# Altium footprint library WR-RAST.PcbLib: 73 footprints (part 3 of 5)
Each footprint in its own frame and in the unit in brackets; x right, y up, seen from the top. Pads: shape width x height; smd on the part's side, far side on the other; paste and mask are expansions set on the pad; w line width, h text height; cw(c..) or ccw(c..) is an arc to the next point about the centre after c.
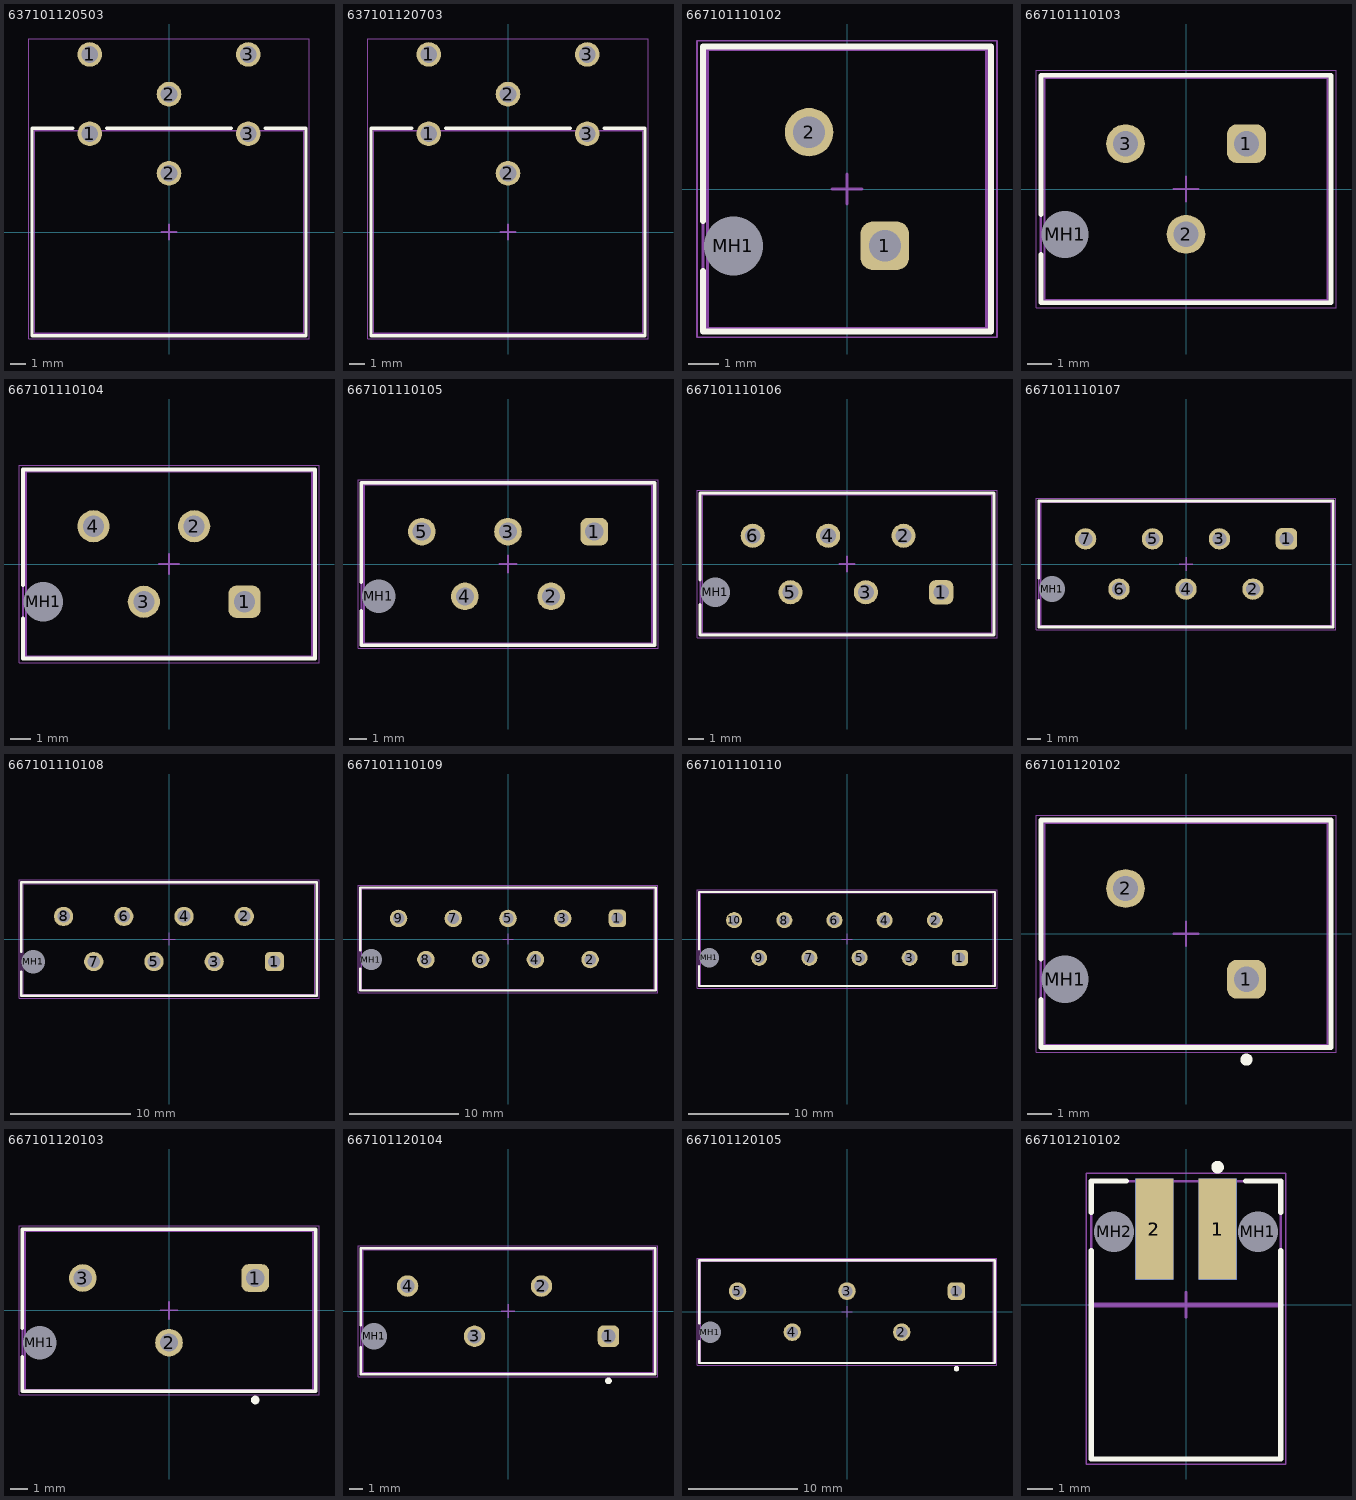
[diagram p2: the footprints below, top view; thin cyan lines are the x and y axes]

## 637101120503 [mm] "THT Horizontal Male Header, pitch 5mm, 3p"
height 14.9
pads (6):
  round 1.55 hole 1.05: 1(-5,6.201) 1(-5,11.201) 2(0,3.701) 2(0,8.701) 3(5,6.201) 3(5,11.201)
Top Overlay:
  lines w0.2: -6.05,6.55 -8.65,6.55 -8.65,-6.55 8.65,-6.55 8.65,6.55 6.05,6.55 ; -3.95,6.55 3.95,6.55
Top Assembly:
  lines w0.1: -8.5,-6.4 -8.5,6.4 8.5,6.4 8.5,-6.4 -8.5,-6.4
Top Designator:
  text ".Designator" at -3.647,-0.357 h1
Top Courtyard:
  lines w0.05: -8.85,-6.75 -8.85,12.176 8.85,12.176 8.85,-6.75 -8.85,-6.75
Top Component Center:
  lines w0.1: -0.5,0 0.5,0 ; 0,-0.5 0,0.5
3D body "637101120503.stp": height 15.45, standoff -3.45, extent -8.501,-6.401 8.501,11.601

## 637101120703 [mm] "THT Horizontal Male Header, pitch 5mm, 3p"
height 14.9
pads (6):
  round 1.55 hole 1.05: 1(-5,6.201) 1(-5,11.201) 2(0,3.701) 2(0,8.701) 3(5,6.201) 3(5,11.201)
Top Overlay:
  lines w0.2: -6.05,6.55 -8.65,6.55 -8.65,-6.55 8.65,-6.55 8.65,6.55 6.05,6.55 ; -3.95,6.55 3.95,6.55
Top Assembly:
  lines w0.1: -8.5,-6.4 -8.5,6.4 8.5,6.4 8.5,-6.4 -8.5,-6.4
Top Designator:
  text ".Designator" at -3.647,-0.357 h1
Top Courtyard:
  lines w0.05: -8.85,-6.75 -8.85,12.176 8.85,12.176 8.85,-6.75 -8.85,-6.75
Top Component Center:
  lines w0.1: -0.5,0 0.5,0 ; 0,-0.5 0,0.5
3D body "637101120703.stp": height 15.45, standoff -3.45, extent -8.501,-6.401 8.501,11.601

## 667101110102 [mm] "RAST 2.5 Header Vertical THT 2.5mm Pitch for Direct or Indirect Mating with locking features, 02p"
height 15.6
pads (3):
  rrect50% 1.6x1.6 hole 1.05: 1(1.25,-1.875)
  round 1.6 hole 1.05: 2(-1.25,1.875)
  round 1.85 hole 1.95 unplated: MH1(-3.75,-1.875)
Top Overlay:
  lines w0.2: -4.75,-2.7 -4.75,-4.7 4.75,-4.7 4.75,4.7 -4.75,4.7 -4.75,-1.05
Top Assembly:
  lines w0.1: -4.75,-4.7 4.75,-4.7 4.75,4.7 -4.75,4.7 -4.75,-4.7
Top Designator:
  text ".Designator" at -3.647,-0.357 h1
Top 3D Body:
  lines w0.1: -4.6,-4.6 4.6,-4.6 4.6,4.6 -4.6,4.6 -4.6,-4.6
Top Courtyard:
  lines w0.05: -4.95,-4.9 4.95,-4.9 4.95,4.9 -4.95,4.9 -4.95,-4.9
Top Component Center:
  lines w0.1: -0.5,0 0.5,0 ; 0,-0.5 0,0.5
3D body "667101110102.stp": height 15.65, standoff -4.25, extent -4.6,-4.6 4.6,4.6

## 667101110103 [mm] "RAST 2.5 Header Vertical THT 2.5mm Pitch for Direct or Indirect Mating with locking features, 03p"
height 15.6
pads (4):
  rrect50% 1.6x1.6 hole 1.05: 1(2.5,1.875)
  round 1.6 hole 1.05: 2(0,-1.875) 3(-2.5,1.875)
  round 1.85 hole 1.95 unplated: MH1(-5,-1.875)
Top Overlay:
  lines w0.2: -6,-2.7 -6,-4.7 6,-4.7 6,4.7 -6,4.7 -6,-1.05
Top Assembly:
  lines w0.1: -6,-4.7 6,-4.7 6,4.7 -6,4.7 -6,-4.7
Top Designator:
  text ".Designator" at -3.647,-0.357 h1
Top 3D Body:
  lines w0.1: -5.85,-4.6 5.85,-4.6 5.85,4.6 -5.85,4.6 -5.85,-4.6
Top Courtyard:
  lines w0.05: -6.2,-4.9 6.2,-4.9 6.2,4.9 -6.2,4.9 -6.2,-4.9
Top Component Center:
  lines w0.1: -0.5,0 0.5,0 ; 0,-0.5 0,0.5
3D body "667101110103.stp": height 15.65, standoff -4.25, extent -5.85,-4.6 5.85,4.6

## 667101110104 [mm] "RAST 2.5 Header Vertical THT 2.5mm Pitch for Direct or Indirect Mating with locking features, 04p"
height 15.6
pads (5):
  rrect50% 1.6x1.6 hole 1.05: 1(3.75,-1.875)
  round 1.6 hole 1.05: 2(1.25,1.875) 3(-1.25,-1.875) 4(-3.75,1.875)
  round 1.85 hole 1.95 unplated: MH1(-6.25,-1.875)
Top Overlay:
  lines w0.2: -7.25,-2.7 -7.25,-4.7 7.25,-4.7 7.25,4.7 -7.25,4.7 -7.25,-1.05
Top Assembly:
  lines w0.1: -7.25,-4.7 -7.25,4.7 7.25,4.7 7.25,-4.7 -7.25,-4.7
Top Designator:
  text ".Designator" at -3.647,-0.357 h1
Top 3D Body:
  lines w0.1: -7.1,-4.6 -7.1,4.6 7.1,4.6 7.1,-4.6 -7.1,-4.6
Top Courtyard:
  lines w0.05: -7.45,-4.9 -7.45,4.9 7.45,4.9 7.45,-4.9 -7.45,-4.9
Top Component Center:
  lines w0.1: -0.5,0 0.5,0 ; 0,-0.5 0,0.5
3D body "667101110104.stp": height 15.65, standoff -4.25, extent -7.1,-4.6 7.1,4.6

## 667101110105 [mm] "RAST 2.5 Header Vertical THT 2.5mm Pitch for Direct or Indirect Mating with locking features, 05p"
height 15.6
pads (6):
  rrect50% 1.6x1.6 hole 1.05: 1(5,1.875)
  round 1.6 hole 1.05: 2(2.5,-1.875) 3(0,1.875) 4(-2.5,-1.875) 5(-5,1.875)
  round 1.85 hole 1.95 unplated: MH1(-7.5,-1.875)
Top Overlay:
  lines w0.2: -8.5,-2.7 -8.5,-4.7 8.5,-4.7 8.5,4.7 -8.5,4.7 -8.5,-1.05
Top Assembly:
  lines w0.1: -8.5,-4.7 8.5,-4.7 8.5,4.7 -8.5,4.7 -8.5,-4.7
Top Designator:
  text ".Designator" at -3.647,-0.357 h1
Top 3D Body:
  lines w0.1: -8.35,-4.6 8.35,-4.6 8.35,4.6 -8.35,4.6 -8.35,-4.6
Top Courtyard:
  lines w0.05: -8.7,-4.9 8.7,-4.9 8.7,4.9 -8.7,4.9 -8.7,-4.9
Top Component Center:
  lines w0.1: -0.5,0 0.5,0 ; 0,-0.5 0,0.5
3D body "667101110105.stp": height 15.65, standoff -4.25, extent -8.35,-4.6 8.45,4.6

## 667101110106 [mm] "RAST 2.5 Header Vertical THT 2.5mm Pitch for Direct or Indirect Mating with locking features, 06p"
height 15.6
pads (7):
  rrect50% 1.6x1.6 hole 1.05: 1(6.25,-1.875)
  round 1.6 hole 1.05: 2(3.75,1.875) 3(1.25,-1.875) 4(-1.25,1.875) 5(-3.75,-1.875) 6(-6.25,1.875)
  round 1.85 hole 1.95 unplated: MH1(-8.75,-1.875)
Top Overlay:
  lines w0.2: -9.75,-2.7 -9.75,-4.7 9.75,-4.7 9.75,4.7 -9.75,4.7 -9.75,-1.05
Top Assembly:
  lines w0.1: -9.75,-4.7 9.75,-4.7 9.75,4.7 -9.75,4.7 -9.75,-4.7
Top Designator:
  text ".Designator" at -3.647,-0.357 h1
Top 3D Body:
  lines w0.1: -9.6,-4.6 9.6,-4.6 9.6,4.6 -9.6,4.6 -9.6,-4.6
Top Courtyard:
  lines w0.05: -9.95,-4.9 9.95,-4.9 9.95,4.9 -9.95,4.9 -9.95,-4.9
Top Component Center:
  lines w0.1: -0.5,0 0.5,0 ; 0,-0.5 0,0.5
3D body "667101110106.stp": height 15.65, standoff -4.25, extent -9.6,-4.6 9.7,4.6

## 667101110107 [mm] "RAST 2.5 Header Vertical THT 2.5mm Pitch for Direct or Indirect Mating with locking features, 07p"
height 15.6
pads (8):
  rrect50% 1.6x1.6 hole 1.05: 1(7.5,1.875)
  round 1.6 hole 1.05: 2(5,-1.875) 3(2.5,1.875) 4(0,-1.875) 5(-2.5,1.875) 6(-5,-1.875) 7(-7.5,1.875)
  round 1.85 hole 1.95 unplated: MH1(-10,-1.875)
Top Overlay:
  lines w0.2: -11,-2.7 -11,-4.7 11,-4.7 11,4.7 -11,4.7 -11,-1.05
Top Assembly:
  lines w0.1: -11,-4.7 -11,4.7 11,4.7 11,-4.7 -11,-4.7
Top Designator:
  text ".Designator" at -3.647,-0.357 h1
Top 3D Body:
  lines w0.1: -10.85,-4.6 -10.85,4.6 10.85,4.6 10.85,-4.6 -10.85,-4.6
Top Courtyard:
  lines w0.05: -11.2,-4.9 -11.2,4.9 11.2,4.9 11.2,-4.9 -11.2,-4.9
Top Component Center:
  lines w0.1: -0.5,0 0.5,0 ; 0,-0.5 0,0.5
3D body "667101110107.stp": height 15.65, standoff -4.25, extent -10.85,-4.6 10.95,4.6

## 667101110108 [mm] "RAST 2.5 Header Vertical THT 2.5mm Pitch for Direct or Indirect Mating with locking features, 08p"
height 15.6
pads (9):
  rrect50% 1.6x1.6 hole 1.05: 1(8.75,-1.875)
  round 1.6 hole 1.05: 2(6.25,1.875) 3(3.75,-1.875) 4(1.25,1.875) 5(-1.25,-1.875) 6(-3.75,1.875) 7(-6.25,-1.875) 8(-8.75,1.875)
  round 1.85 hole 1.95 unplated: MH1(-11.25,-1.875)
Top Overlay:
  lines w0.2: -12.25,-2.7 -12.25,-4.7 12.25,-4.7 12.25,4.7 -12.25,4.7 -12.25,-1.05
Top Assembly:
  lines w0.1: -12.25,-4.7 12.25,-4.7 12.25,4.7 -12.25,4.7 -12.25,-4.7
Top Designator:
  text ".Designator" at -3.647,-0.357 h1
Top 3D Body:
  lines w0.1: -12.1,-4.6 12.1,-4.6 12.1,4.6 -12.1,4.6 -12.1,-4.6
Top Courtyard:
  lines w0.05: -12.45,-4.9 12.45,-4.9 12.45,4.9 -12.45,4.9 -12.45,-4.9
Top Component Center:
  lines w0.1: -0.5,0 0.5,0 ; 0,-0.5 0,0.5
3D body "667101110108.stp": height 15.65, standoff -4.25, extent -12.1,-4.6 12.2,4.6

## 667101110109 [mm] "RAST 2.5 Header Vertical THT 2.5mm Pitch for Direct or Indirect Mating with locking features, 09p"
height 15.6
pads (10):
  rrect50% 1.6x1.6 hole 1.05: 1(10,1.875)
  round 1.6 hole 1.05: 2(7.5,-1.875) 3(5,1.875) 4(2.5,-1.875) 5(0,1.875) 6(-2.5,-1.875) 7(-5,1.875) 8(-7.5,-1.875) 9(-10,1.875)
  round 1.85 hole 1.95 unplated: MH1(-12.5,-1.875)
Top Overlay:
  lines w0.2: -13.5,-2.7 -13.5,-4.7 13.5,-4.7 13.5,4.7 -13.5,4.7 -13.5,-1.05
Top Assembly:
  lines w0.1: -13.5,-4.7 -13.5,4.7 13.5,4.7 13.5,-4.7 -13.5,-4.7
Top Designator:
  text ".Designator" at -3.647,-0.357 h1
Top 3D Body:
  lines w0.1: -13.35,-4.6 -13.35,4.6 13.35,4.6 13.35,-4.6 -13.35,-4.6
Top Courtyard:
  lines w0.05: -13.7,-4.9 -13.7,4.9 13.7,4.9 13.7,-4.9 -13.7,-4.9
Top Component Center:
  lines w0.1: -0.5,0 0.5,0 ; 0,-0.5 0,0.5
3D body "667101110109.stp": height 15.65, standoff -4.25, extent -13.35,-4.6 13.45,4.6

## 667101110110 [mm] "RAST 2.5 Header Vertical THT 2.5mm Pitch for Direct or Indirect Mating with locking features, 10p"
height 15.6
pads (11):
  rrect50% 1.6x1.6 hole 1.05: 1(11.25,-1.875)
  round 1.6 hole 1.05: 2(8.75,1.875) 3(6.25,-1.875) 4(3.75,1.875) 5(1.25,-1.875) 6(-1.25,1.875) 7(-3.75,-1.875) 8(-6.25,1.875) 9(-8.75,-1.875) 10(-11.25,1.875)
  round 1.85 hole 1.95 unplated: MH1(-13.75,-1.875)
Top Overlay:
  lines w0.2: -14.75,-2.7 -14.75,-4.7 14.75,-4.7 14.75,4.7 -14.75,4.7 -14.75,-1.05
Top Assembly:
  lines w0.1: -14.75,-4.7 -14.75,4.7 14.75,4.7 14.75,-4.7 -14.75,-4.7
Top Designator:
  text ".Designator" at -3.647,-0.357 h1
Top 3D Body:
  lines w0.1: -14.6,-4.6 -14.6,4.6 14.6,4.6 14.6,-4.6 -14.6,-4.6
Top Courtyard:
  lines w0.05: -14.95,-4.9 -14.95,4.9 14.95,4.9 14.95,-4.9 -14.95,-4.9
Top Component Center:
  lines w0.1: -0.5,0 0.5,0 ; 0,-0.5 0,0.5
3D body "667101110110.stp": height 15.65, standoff -4.25, extent -14.6,-4.6 14.7,4.6

## 667101120102 [mm] "RAST 2.5 Header vertical THT 5mm Pitch for Direct or Indirect Mating with locking features, 02p"
height 15.6
pads (3):
  rrect50% 1.6x1.6 hole 1.05: 1(2.5,-1.875)
  round 1.6 hole 1.05: 2(-2.5,1.875)
  round 1.85 hole 1.95 unplated: MH1(-5,-1.875)
Top Overlay:
  circle w0.25: c2.5,-5.2 r0.125
  lines w0.2: -6,-2.7 -6,-4.7 6,-4.7 6,4.7 -6,4.7 -6,-1.05
Top Assembly:
  lines w0.1: -6,-4.7 6,-4.7 6,4.7 -6,4.7 -6,-4.7
Top Designator:
  text ".Designator" at -3.647,-0.357 h1
Top 3D Body:
  lines w0.1: -5.85,-4.6 -5.85,4.6 5.85,4.6 5.85,-4.6 -5.85,-4.6
Top Courtyard:
  lines w0.05: -6.2,-4.9 -6.2,4.9 6.2,4.9 6.2,-4.9 -6.2,-4.9
Top Component Center:
  lines w0.1: -0.5,0 0.5,0 ; 0,-0.5 0,0.5
3D body "667101120102.stp": height 15.65, standoff -4.25, extent -5.85,-4.6 5.85,4.6

## 667101120103 [mm] "RAST 2.5 Header vertical THT 5mm Pitch for Direct or Indirect Mating with locking features, 03p"
height 15.6
pads (4):
  rrect50% 1.6x1.6 hole 1.05: 1(5,1.875)
  round 1.6 hole 1.05: 2(0,-1.875) 3(-5,1.875)
  round 1.85 hole 1.95 unplated: MH1(-7.5,-1.875)
Top Overlay:
  circle w0.25: c5,-5.2 r0.125
  lines w0.2: -8.5,-2.7 -8.5,-4.7 8.5,-4.7 8.5,4.7 -8.5,4.7 -8.5,-1.05
Top Assembly:
  lines w0.1: -8.5,-4.7 -8.5,4.7 8.5,4.7 8.5,-4.7 -8.5,-4.7
Top Designator:
  text ".Designator" at -3.647,-0.357 h1
Top 3D Body:
  lines w0.1: -8.35,-4.6 8.35,-4.6 8.35,4.6 -8.35,4.6 -8.35,-4.6
Top Courtyard:
  lines w0.05: -8.7,-4.9 8.7,-4.9 8.7,4.9 -8.7,4.9 -8.7,-4.9
Top Component Center:
  lines w0.1: -0.5,0 0.5,0 ; 0,-0.5 0,0.5
3D body "667101120103.stp": height 15.65, standoff -4.25, extent -8.35,-4.6 8.35,4.6

## 667101120104 [mm] "RAST 2.5 Header vertical THT 5mm Pitch for Direct or Indirect Mating with locking features, 04p"
height 15.6
pads (5):
  rrect50% 1.6x1.6 hole 1.05: 1(7.5,-1.875)
  round 1.6 hole 1.05: 2(2.5,1.875) 3(-2.5,-1.875) 4(-7.5,1.875)
  round 1.85 hole 1.95 unplated: MH1(-10,-1.875)
Top Overlay:
  circle w0.25: c7.5,-5.2 r0.125
  lines w0.2: -11,-2.7 -11,-4.7 11,-4.7 11,4.7 -11,4.7 -11,-1.05
Top Assembly:
  lines w0.1: -11,-4.7 -11,4.7 11,4.7 11,-4.7 -11,-4.7
Top Designator:
  text ".Designator" at -3.647,-0.357 h1
Top 3D Body:
  lines w0.1: -10.85,-4.6 10.85,-4.6 10.85,4.6 -10.85,4.6 -10.85,-4.6
Top Courtyard:
  lines w0.05: -11.2,-4.9 11.2,-4.9 11.2,4.9 -11.2,4.9 -11.2,-4.9
Top Component Center:
  lines w0.1: -0.5,0 0.5,0 ; 0,-0.5 0,0.5
3D body "667101120104.stp": height 15.65, standoff -4.25, extent -10.85,-4.6 10.85,4.6

## 667101120105 [mm] "RAST 2.5 Header vertical THT 5mm Pitch for Direct or Indirect Mating with locking features, 05p"
height 15.6
pads (6):
  rrect50% 1.6x1.6 hole 1.05: 1(10,1.875)
  round 1.6 hole 1.05: 2(5,-1.875) 3(0,1.875) 4(-5,-1.875) 5(-10,1.875)
  round 1.85 hole 1.95 unplated: MH1(-12.5,-1.875)
Top Overlay:
  circle w0.25: c10,-5.2 r0.125
  lines w0.2: -13.5,-2.7 -13.5,-4.7 13.5,-4.7 13.5,4.7 -13.5,4.7 -13.5,-1.05
Top Assembly:
  lines w0.1: -13.5,-4.7 13.5,-4.7 13.5,4.7 -13.5,4.7 -13.5,-4.7
Top Designator:
  text ".Designator" at -3.647,-0.357 h1
Top 3D Body:
  lines w0.1: -13.35,-4.6 -13.35,4.6 13.35,4.6 13.35,-4.6 -13.35,-4.6
Top Courtyard:
  lines w0.05: -13.7,-4.9 -13.7,4.9 13.7,4.9 13.7,-4.9 -13.7,-4.9
Top Component Center:
  lines w0.1: -0.5,0 0.5,0 ; 0,-0.5 0,0.5
3D body "667101120105.stp": height 15.65, standoff -4.25, extent -13.35,-4.6 13.35,4.6

## 667101210102 [mm] "RAST Housing 2.5mm Pitch for Direct or Indirect Mating with lockign features, 2p"
height 7.35
pads (6):
  rect 1.5x4 smd: 1(1.25,3) 2(-1.25,3)
  rect 1.5x4 smd far side: 1(1.25,3) 2(-1.25,3)
  round 1.5 hole 1.6 unplated: MH1(2.85,2.9) MH2(-2.85,2.9)
Top Overlay:
  circle w0.25: c1.25,5.45 r0.125
  lines w0.2: -3.75,2.15 -3.75,-6.1 3.75,-6.1 3.75,2.15 ; -3.75,3.65 -3.75,4.9 -2.35,4.9 ; 2.35,4.9 3.75,4.9 3.75,3.65
Assembly Notes:
  lines w0.2: -3.75,0 3.75,0
  text "PCB Edge" at -2.443,-1.378 h1.2
Top Assembly:
  lines w0.1: -3.75,-6.1 3.75,-6.1 3.75,4.9 -3.75,4.9 -3.75,-6.1
Top Designator:
  text ".Designator" at -3.647,-0.357 h1
Top 3D Body:
  lines w0.1: -3.75,-6.1 3.75,-6.1 3.75,4.9 -3.75,4.9 -3.75,-6.1
Top Courtyard:
  lines w0.05: -3.95,-6.3 -3.95,5.2 3.95,5.2 3.95,-6.3 -3.95,-6.3
Top Component Center:
  lines w0.1: -0.5,0 0.5,0 ; 0,-0.5 0,0.5
3D body "667101210102.stp": height 3.17, standoff -4.17, extent -3.75,-6.1 3.75,4.9